# EAGLE library part AS5600-MODULE (library moto-anomaly)
AS5600-MODULE AS5600 12-bit manyetik aci enkoderi (salincak/direksiyon acisi, ileri asama). Kart: 23.0 x 23.0 mm - Guven: M STEP: GrabCAD 'AS5600 magnetic encoder module'
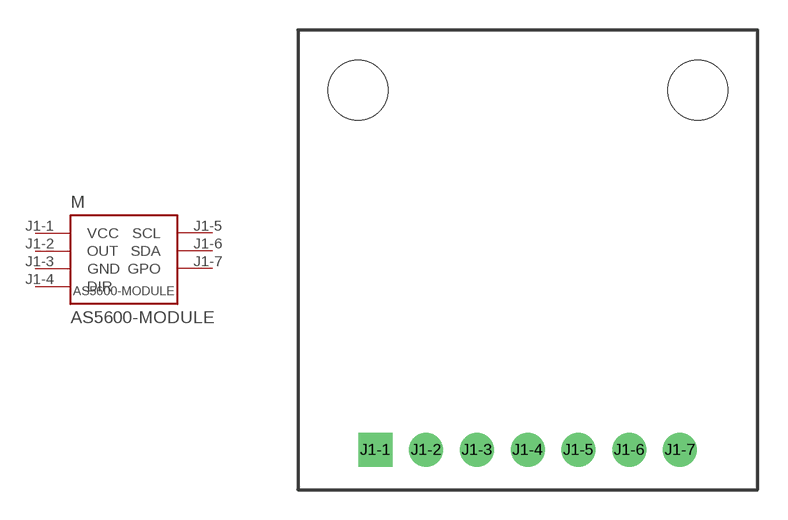
[diagram p6: symbol with the pads of AS5600-MODULE; footprint AS5600-MODULE]

Designator prefix M

## AS5600-MODULE (BOARD_SIZE: 23.0x23.0mm; CONFIDENCE: M)  [AS5600-MODULE]
J1-1  VCC  pas
J1-2  OUT  pas
J1-3  GND  pas
J1-4  DIR  pas
J1-5  SCL  pas
J1-6  SDA  pas
J1-7  GPO  pas

## Footprint AS5600-MODULE (pad centres in mm)
AS5600 12-bit manyetik aci enkoderi (salincak/direksiyon acisi, ileri asama). | Kart: 23.0 x 23.0 mm | Guven: M
drill 1 pad 1.7 square: J1-1 -7.62,-9.5
drill 1 pad 1.7 round: J1-2 -5.08,-9.5; J1-3 -2.54,-9.5; J1-4 0,-9.5; J1-5 2.54,-9.5; J1-6 5.08,-9.5; J1-7 7.62,-9.5
hole 3 at -8.5,8.5
hole 3 at 8.5,8.5